# Altium footprint library Resistor$.PcbLib: 99 footprints (part 3 of 7)
Each footprint in its own frame and in the unit in brackets; x right, y up, seen from the top. Pads: shape width x height; smd on the part's side, far side on the other; paste and mask are expansions set on the pad; w line width, h text height; cw(c..) or ccw(c..) is an arc to the next point about the centre after c.
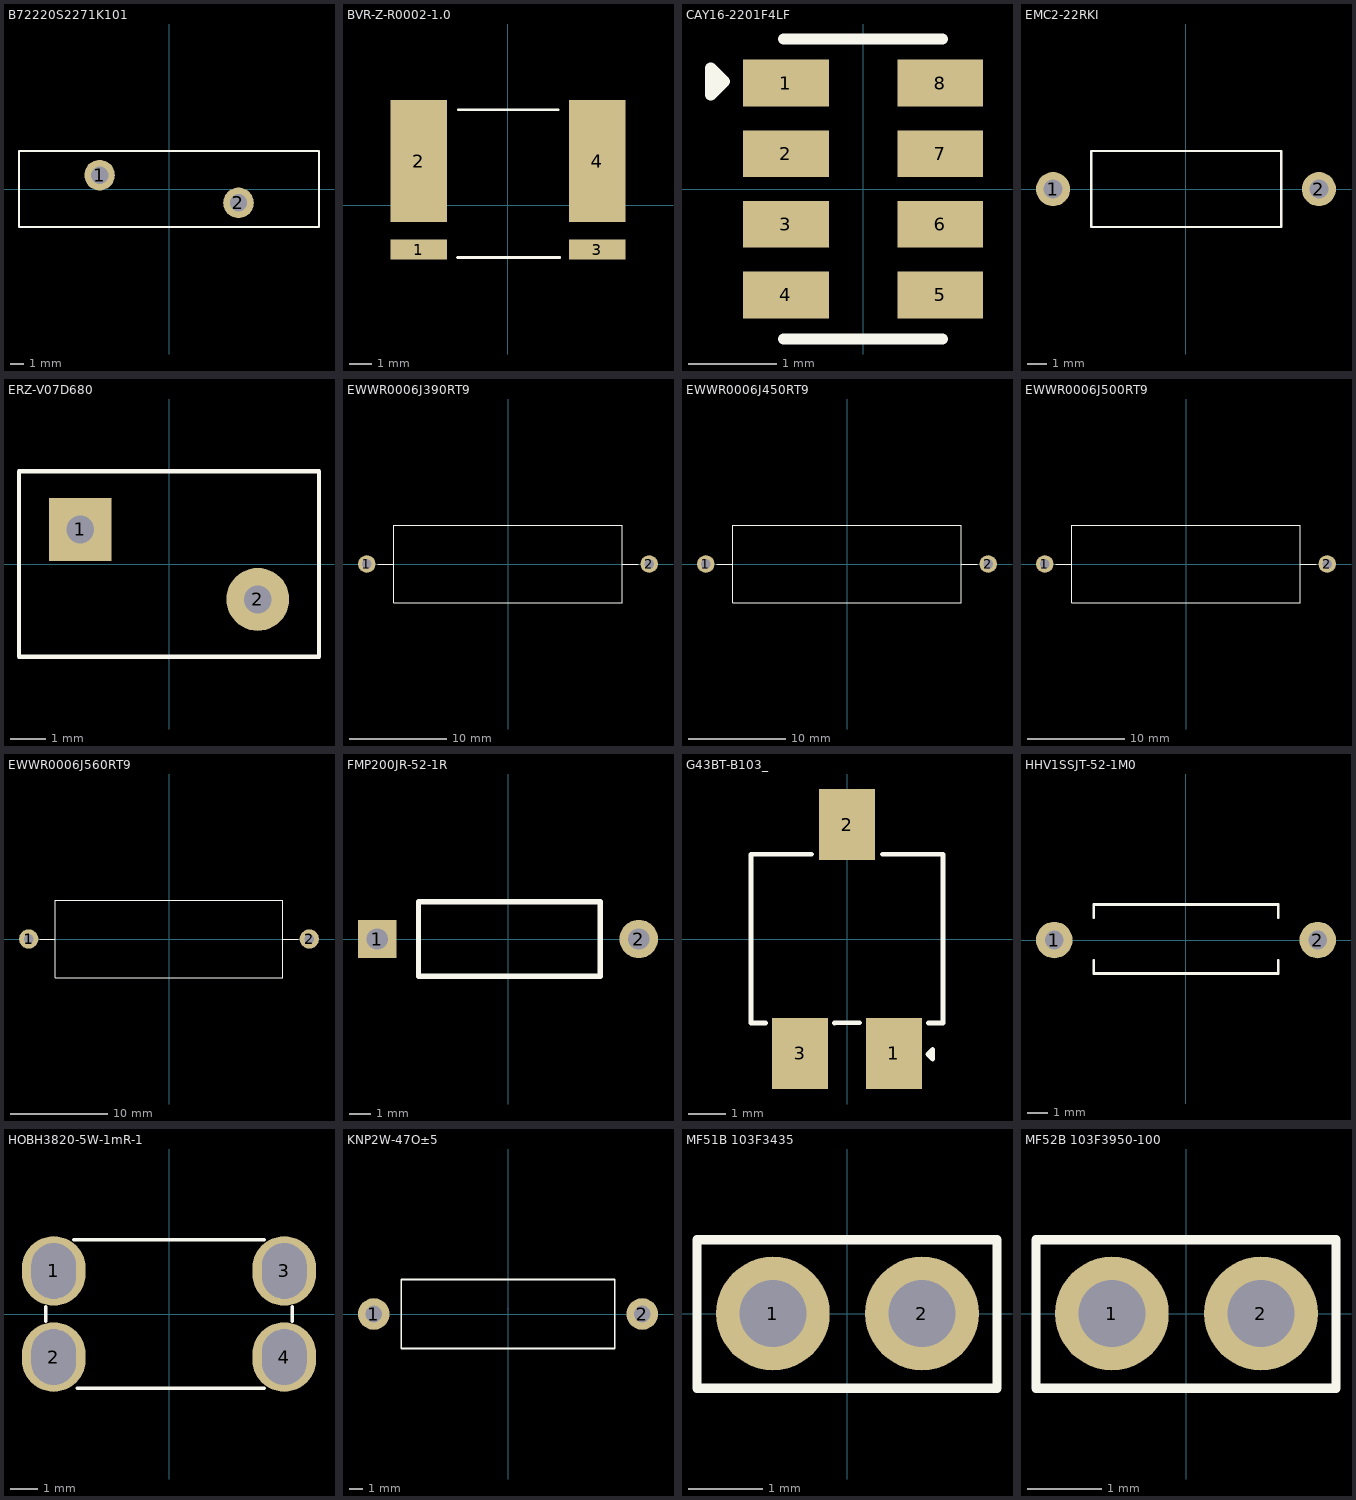
[diagram p2: the footprints below, top view; thin cyan lines are the x and y axes]

## B72220S2271K101 [mm]
pads (2):
  round 2.2 hole 1.25: 1(-5,1) 2(5,-1)
Top Overlay:
  lines w0.127: -10.801,-2.743 -10.801,2.737 -10.795,2.743 10.795,2.743 10.795,-2.743 -10.795,-2.743
3D body "B72220S2271K101.step": height 26, standoff -24.5, extent -10.748,-2.7 10.748,2.7

## BVR-Z-R0002-1.0 [mm]
pads (4):
  rect 2.55x0.9 smd: 1(-4.025,-2) 3(4.025,-2)
  rect 2.55x5.5 smd: 2(-4.025,2) 4(4.025,2)
Top Overlay:
  lines w0.127: -2.286,-2.362 2.337,-2.362 ; -2.235,4.318 2.261,4.318
3D body "BVR-Z-R0002-1.0.STEP": height 3.4, standoff 0, extent -5.05,-2.335 5.05,4.265

## CAY16-2201F4LF [mm]
pads (8):
  rect 0.97x0.53 smd: 1(-0.875,1.2) 2(-0.875,0.4) 3(-0.875,-0.4) 4(-0.875,-1.2) 5(0.875,-1.2) 6(0.875,-0.4) 7(0.875,0.4) 8(0.875,1.2)
Top Overlay:
  lines w0.127: -0.9,-1.7 0.9,-1.7 ; -0.9,1.7 0.9,1.7 ; -1.727,1.067 -1.575,1.219 -1.727,1.372 -1.727,1.067
3D body "CAY16-2201F4LF.step": height 0.6, standoff 0, extent -0.8,-1.6 0.8,1.6

## EMC2-22RKI [mm]
pads (2):
  round 1.8 hole 1: 1(-7,0) 2(7,0)
Top Overlay:
  lines w0.127: -4.993,-1.993 5.007,-1.993 5.007,2.007 -4.993,2.007 -4.993,-1.993
3D body "EMC2-22RKI_14mm.STEP": height 4.49, standoff -3.5, extent -7.4,-2.019 7.4,1.981

## ERZ-V07D680 [mm]
pads (2):
  rect 1.8x1.8 hole 0.8: 1(-2.54,1)
  round 1.8 hole 0.8: 2(2.54,-1)
Top Overlay:
  lines w0.127: -4.293,-2.642 4.293,-2.642 4.293,2.667 -4.293,2.667 -4.293,-2.642
3D body "ERZ-V07D6802.STEP": height 13.25, standoff -18.25, extent -4.25,-2.591 4.25,2.609

## EWWR0006J390RT9 [mm]
pads (2):
  round 1.8 hole 1: 1(-14.5,0) 2(14.5,0)
Top Overlay:
  lines w0.127: -13.369,0 -11.75,0 ; -11.75,4 -11.75,-4 11.75,-4 11.75,4 -11.715,4 ; 11.75,0 13.369,0
3D body "C348979.step": height 8, standoff -5, extent -14.875,-3.986 14.875,3.986

## EWWR0006J450RT9 [mm]
pads (2):
  round 1.8 hole 1: 1(-14.5,0) 2(14.5,0)
Top Overlay:
  lines w0.127: -13.369,0 -11.75,0 ; -11.75,4 -11.75,-4 11.75,-4 11.75,4 -11.715,4 ; 11.75,0 13.369,0
3D body "C348979.step": height 8, standoff -5, extent -14.875,-3.986 14.875,3.986

## EWWR0006J500RT9 [mm]
pads (2):
  round 1.8 hole 1 paste-2539.97 mask+0.051: 1(-14.5,0) 2(14.5,0)
Top Overlay:
  lines w0.127: -13.369,0 -11.75,0 ; -11.75,4 -11.75,-4 11.75,-4 11.75,4 -11.715,4 ; 11.75,0 13.369,0
3D body "C348990.step": height 8, standoff -5, extent -14.875,-3.986 14.875,3.986

## EWWR0006J560RT9 [mm]
pads (2):
  round 2 hole 1 paste-2539.97 mask+0.051: 1(-14.5,0) 2(14.5,0)
Top Overlay:
  lines w0.127: -13.369,0 -11.75,0 ; -11.75,4 -11.75,-4 11.75,-4 11.75,4 -11.715,4 ; 11.75,0 13.369,0
3D body "C348992.step": height 8, standoff -5, extent -14.875,-3.986 14.875,3.986

## FMP200JR-52-1R [mm]
pads (2):
  rect 1.8x1.8 hole 1: 1(-6.125,0)
  round 1.8 hole 1: 2(6.125,0)
Top Overlay:
  lines w0.254: -4.191,-1.753 4.318,-1.753 4.318,1.753 -4.191,1.753 -4.191,-1.753
3D body "FMP200JR-52-1R.STEP": height 3.29, standoff -21.35, extent -6.4,-1.65 6.4,1.65

## G43BT-B103_ [mm] "±100ppm/? ±20% 10kO Variable Resistors SMD Variable Resistors/Potentiometers ROHS"
pads (3):
  rect 1.5x1.9 smd: 1(1.25,-3.05) 2(0,3.05) 3(-1.25,-3.05)
Top Overlay:
  lines w0.127: -2.164,-2.237 -2.559,-2.237 -2.559,2.259 -0.945,2.259 ; -0.336,-2.237 0.33,-2.235 ; 0.945,2.259 2.559,2.259 2.559,-2.237 2.164,-2.237 ; 2.159,-3.073 2.286,-2.946 2.286,-3.2 2.159,-3.073
3D body "G43BT-B103.STEP": height 2.5, standoff 0, extent -2.5,-3.15 2.5,3.15

## HHV1SSJT-52-1M0 [mm]
pads (2):
  round 1.8 hole 0.92: 1(-6.5,0) 2(6.5,0)
Top Overlay:
  lines w0.127: -4.547,-0.991 -4.547,-1.651 4.547,-1.651 4.547,-0.991 ; -4.547,1.092 -4.547,1.753 4.547,1.753 4.547,1.092
3D body "HHV1SSJT-52-1M0.STEP": height 3.9, standoff -4.4, extent -6.8,-1.587 6.8,1.689

## HOBH3820-5W-1mR-1 [mm]
pads (4):
  oval 2.3x2.5 hole 1.6 slot 2 at 90 deg: 1(-4.15,1.55) 2(-4.15,-1.55) 3(4.15,1.55) 4(4.15,-1.55)
Top Overlay:
  lines w0.127: -4.445,-0.262 -4.445,0.254 ; -3.429,2.667 3.429,2.667 ; -3.302,-2.667 3.429,-2.667 ; 4.445,-0.254 4.445,0.254
3D body "C481547.step": height 2.5, standoff -3.8, extent -4.755,-2.65 4.755,2.65

## KNP2W-47O±5 [mm]
pads (2):
  round 2.3 hole 1.2 paste-2539.97 mask+0.051: 1(-9.75,0) 2(9.75,0)
Top Overlay:
  lines w0.127: -7.75,-2.5 7.75,-2.5 7.75,2.5 -7.75,2.5 -7.75,-2.5
Mechanical 15:
  lines w0.003: 0,0.369 0,0.37
3D body "C122138.step": height 5.01, standoff -3.5, extent -10.05,-2.51 10.05,2.51

## MF51B 103F3435 [mm]
pads (2):
  round 1.524 hole 0.9: 1(-1,0) 2(1,0)
Top Overlay:
  lines w0.127: -2.019,-1.003 -2.019,0.991 2.007,0.991 2.007,-1.003 -2.019,-1.003

## MF52B 103F3950-100 [mm]
pads (2):
  round 1.524 hole 0.9: 1(-1,0) 2(1,0)
Top Overlay:
  lines w0.127: -2.019,-1.003 2.007,-1.003 2.007,0.991 -2.019,0.991 -2.019,-1.003